# Altium schematic symbol library KTD2026EWE-TR.SchLib: 1 symbol
Pins are listed as number, name and electrical type; pins without a type are passive.

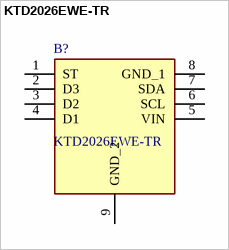
[diagram p0: symbol KTD2026EWE-TR]

## KTD2026EWE-TR
designator B?
LED Lighting Drivers 3-Channel RGB Driver, I2C, 1.5x1.5mm TDFN; Manufacturer_Name: Kinetic Technologies; Geometry.Height: 0.55mm; Mouser Part Number: 389-KTD2026EWETR; Mouser Price/Stock: https://www.mouser.co.uk/ProductDetail/Kinetic-Technologies/KTD2026EWE-TR?qs=lc2O%252BfHJPVZPUWgdBYxlOA%3D%3D; Manufacturer_Part_Number: KTD2026EWE-TR; Datasheet Link: https://componentsearchengine.com/Datasheets/1/KTD2026EWE-TR.pdf
footprint SON40P150X150X55-9N
pins: 1 ST, 2 D3, 3 D2, 4 D1, 5 VIN (power), 6 SCL, 7 SDA, 8 GND_1, 9 GND_2